# Altium footprint library PcbLib1.PcbLib: 15 footprints
Each footprint in its own frame and in the unit in brackets; x right, y up, seen from the top. Pads: shape width x height; smd on the part's side, far side on the other; paste and mask are expansions set on the pad; w line width, h text height; cw(c..) or ccw(c..) is an arc to the next point about the centre after c.
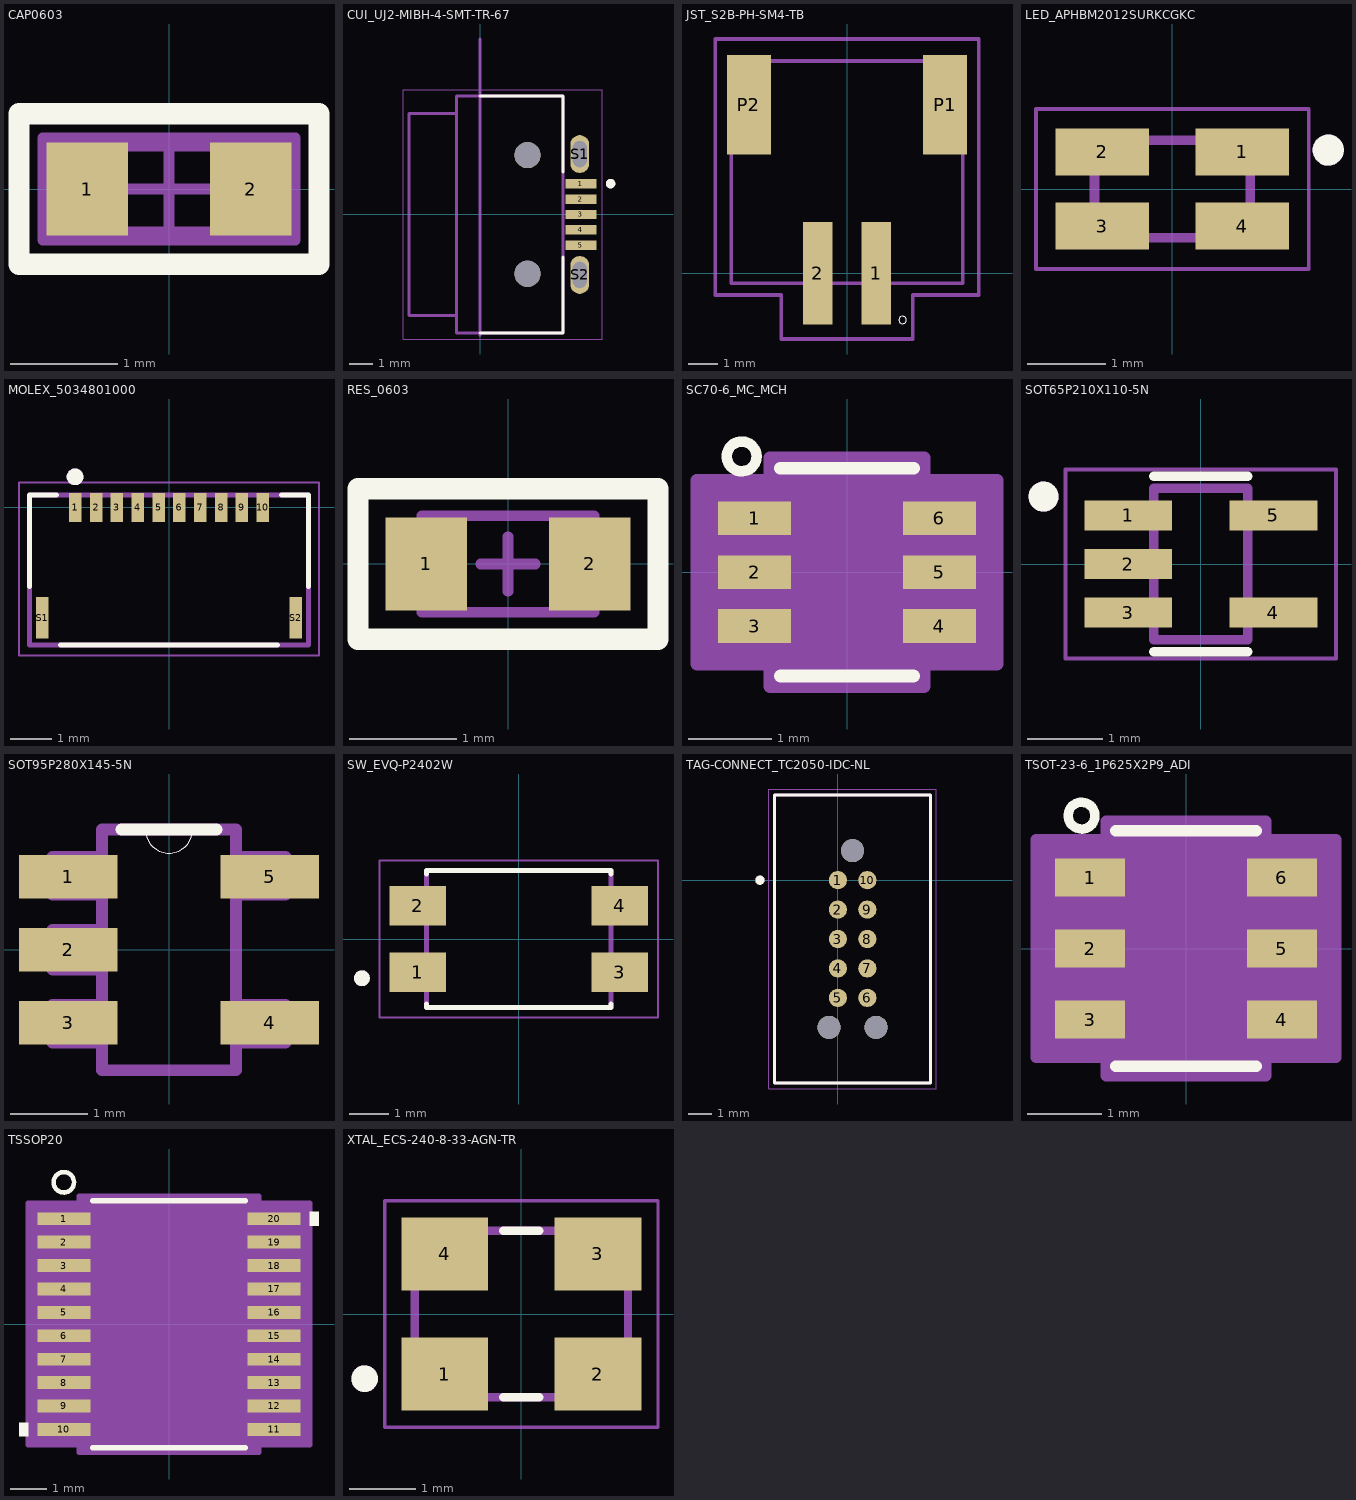
[diagram p0: the footprints below, top view; thin cyan lines are the x and y axes]

## CAP0603 [mil]
pads (2):
  rect 30x34 smd mask+2: 1(-30,0) 2(30,0)
Top Overlay:
  lines w7.87: -55,-27.55 55,-27.55 55,27.55 -55,27.55 -55,-27.55
Mechanical 13:
  lines w3.94: -33.46,-15.75 -33.46,15.75 33.46,15.75 33.46,-15.75 -33.46,-15.75
Mechanical 15:
  lines w3.94: -15.75,0 15.75,0 ; 0,-15.75 0,15.75 ; -46.26,-18.7 -46.26,18.7 46.26,18.7 46.26,-18.7 -46.26,-18.7
3D body "User Library-0603(1608M) Cap.STEP": height 30.71, standoff -0.39, extent -39.37,-15.5 39.38,15.5

## CUI_UJ2-MIBH-4-SMT-TR-67 [mm]
pads (9):
  rect 1.3x0.4 smd mask+0.051: 1(4.25,1.3) 2(4.25,0.65) 3(4.25,0) 4(4.25,-0.65) 5(4.25,-1.3)
  oval 0.8x1.6 hole 0.6 slot 1.1 at 90 deg mask+0.051: S1(4.2,2.55) S2(4.2,-2.55)
  round 1.1 hole 1.1 unplated: ""(2,-2.5) ""(2,2.5)
Top Overlay:
  circle w0.2: c5.5,1.3 r0.1
  lines w0.127: 0,-5 3.5,-5 3.5,-1.8 ; 0,5 3.5,5 3.5,1.8
Mechanical 13:
  circle w0.2: c5.5,1.3 r0.1
  lines w0.127: 0,-5.1 0,7.4 ; -1,-4.25 -3,-4.25 -3,4.25 -1,4.25 ; -1,-4.25 -1,4.25 ; -1,-4.25 -1,-5 3.5,-5 3.5,5 -1,5 -1,4.25
  text "PCB EDGE" at -0.1,5.5 h0.25
Mechanical 15:
  lines w0.05: -3.25,-5.25 5.15,-5.25 5.15,5.25 -3.25,5.25 -3.25,-5.25
3D body "CUI_DEVICES_UJ2-MIBH-4-SMT-TR-67.step": height 4.41, standoff -0.44, extent -3.048,-5 4.602,5

## JST_S2B-PH-SM4-TB [mm]
pads (4):
  rect 1x3.5 smd: 1(1,0) 2(-1,0)
  rect 1.5x3.4 smd: P1(3.35,5.75) P2(-3.35,5.75)
Top Overlay:
  circle w0: c1.9,-1.6 r0.127
Mechanical 13:
  lines w0.127: -3.95,-0.35 -3.95,7.25 3.95,7.25 3.95,-0.35 -3.95,-0.35
Mechanical 15:
  lines w0.127: -4.5,-0.75 -4.5,8 4.5,8 4.5,-0.75 2.25,-0.75 2.25,-2.25 -2.25,-2.25 -2.25,-0.75 -4.5,-0.75
3D body "S2B-PH-SM4-TB.step": height 5.63, standoff 0.03, extent -3.95,-1.361 3.95,7.239

## LED_APHBM2012SURKCGKC [mm]
pads (4):
  rect 1.2x0.6 smd mask+0.051: 1(0.9,0.475) 2(-0.9,0.475) 3(-0.9,-0.475) 4(0.9,-0.475)
Top Overlay:
  circle w0.2: c2,0.5 r0.1
Mechanical 13:
  circle w0.2: c2,0.5 r0.1
  lines w0.127: -1,-0.625 1,-0.625 1,0.625 -1,0.625 -1,-0.625
Mechanical 15:
  lines w0.05: -1.75,-1.025 1.75,-1.025 1.75,1.025 -1.75,1.025 -1.75,-1.025
3D body "APHBM2012SURKCGKC.step": height 0.45, standoff 0, extent -1,-0.625 1,0.625

## MOLEX_5034801000 [mm]
pads (12):
  rect 0.3x0.7 smd: 1(-2.25,0) 2(-1.75,0) 3(-1.25,0) 4(-0.75,0) 5(-0.25,0) 6(0.25,0) 7(0.75,0) 8(1.25,0) 9(1.75,0) 10(2.25,0)
  rect 0.3x1 smd: S1(-3.04,-2.65) S2(3.04,-2.65)
Top Overlay:
  circle w0.2: c-2.255,0.735 r0.1
  lines w0.127: -3.35,-1.9 -3.35,0.3 -2.7,0.3 ; -2.6,-3.3 2.6,-3.3 ; 2.7,0.3 3.35,0.3 3.35,-1.9
Mechanical 13:
  circle w0.2: c-2.255,0.735 r0.1
  lines w0.127: -3.35,-3.3 3.35,-3.3 3.35,0.3 -3.35,0.3 -3.35,-3.3
Mechanical 15:
  lines w0.05: -3.6,-3.55 3.6,-3.55 3.6,0.6 -3.6,0.6 -3.6,-3.55
3D body "5034801000.step": height 1.02, standoff 0, extent -3.35,-3.451 3.35,0.549

## PCBComponent_1 [mm]

## RES_0603 [mil]
pads (2):
  rect 30x34 smd mask+2: 1(-30,0) 2(30,0)
Top Overlay:
  lines w7.87: -55,-27.56 55,-27.56 55,27.56 -55,27.56 -55,-27.56
Mechanical 13:
  lines w3.94: -31.5,-17.72 31.5,-17.72 31.5,17.72 -31.5,17.72 -31.5,-17.72
Mechanical 15:
  lines w3.94: -10,0 10,0 ; 0,-10 0,10 ; -55,-29.53 55,-29.53 55,29.53 -55,29.53 -55,-29.53
3D body "User Library-Panasonic0603.STEP": height 17.72, standoff 0, extent -31.49,-16.13 31.5,16.15

## SC70-6_MC_MCH [mil]
pads (6):
  rect 34.67x16 smd paste+0 mask+0: 1(-43.91,25.59) 2(-43.91,0) 3(-43.91,-25.59) 4(43.91,-25.59) 5(43.91,0) 6(43.91,25.59)
Top Overlay:
  circle w5: c-50,55 r7.07
  lines w6: -31.57,-49.29 31.57,-49.29 ; -31.57,49.29 31.57,49.29
Mechanical 13:
  lines w0: -12,44.29 ccw(c0,44.29) 12,44.29
  lines w1: -47.24,-33.59 -26.57,-33.59 -26.57,-17.59 -47.24,-17.59 -47.24,-33.59 ; -47.24,-8 -26.57,-8 -26.57,8 -47.24,8 -47.24,-8 ; -47.24,17.59 -26.57,17.59 -26.57,33.59 -47.24,33.59 -47.24,17.59 ; -26.57,-44.29 -26.57,44.29 26.57,44.29 26.57,-44.29 -26.57,-44.29 ; 26.57,-33.59 47.24,-33.59 47.24,-17.59 26.57,-17.59 26.57,-33.59 ; 26.57,-8 47.24,-8 47.24,8 26.57,8 26.57,-8 ; 26.57,17.59 47.24,17.59 47.24,33.59 26.57,33.59 26.57,17.59
  text "*" at -29.07,-1.41 h50
Mechanical 15:
  region: 36.57,-54.29 -36.57,-54.29 -36.57,-43.59 -71.24,-43.59 -71.24,43.59 -36.57,43.59 -36.57,54.29 36.57,54.29 36.57,43.59 71.24,43.59 71.24,-43.59 36.57,-43.59
  lines w6: -71.24,-43.59 -71.24,43.59 -36.57,43.59 -36.57,54.29 36.57,54.29 36.57,43.59 71.24,43.59 71.24,-43.59 36.57,-43.59 36.57,-54.29 -36.57,-54.29 -36.57,-43.59 -71.24,-43.59
3D body "SC70-6_MC_MCH.step": height 43.43, standoff 0, extent -47.24,-44.29 47.24,44.29

## SOT65P210X110-5N [mm]
pads (5):
  rect 1.17x0.4 smd mask+0.051: 1(-0.97,0.65) 2(-0.97,0) 3(-0.97,-0.65) 4(0.97,-0.65) 5(0.97,0.65)
Top Overlay:
  circle w0.2: c-2.1,0.9 r0.1
  lines w0.127: -0.625,-1.17 0.625,-1.17 ; -0.625,1.17 0.625,1.17
Mechanical 13:
  circle w0.2: c-2.1,0.9 r0.1
  lines w0.127: -0.625,-1.012 0.625,-1.012 0.625,1.012 -0.625,1.012 -0.625,-1.012
Mechanical 15:
  lines w0.05: -1.805,-1.262 1.805,-1.262 1.805,1.262 -1.805,1.262 -1.805,-1.262
3D body "SC-70_C5_MCH.step": height 1.09, standoff 0, extent -1.194,-1.115 1.194,1.095

## SOT95P280X145-5N [mil]
pads (5):
  rect 50x22 smd: 1(-51,37) 2(-51,0) 3(-51,-37) 4(51,-37) 5(51,37)
Top Overlay:
  lines w0: -12,61 ccw(c0,61) 12,61
  lines w6: -24,61 -12,61 12,61 24,61
Mechanical 13:
  lines w0: -12,61 ccw(c0,61) 12,61
  lines w6: -34,-47 -59,-47 -59,-28 -34,-28 ; -34,-47 -34,-28 ; -34,-47 -34,-61 34,-61 34,-47 ; -34,-28 -34,-10 ; -34,-10 -59,-10 -59,10 -34,10 ; -34,-10 -34,10 ; -34,10 -34,28 ; -34,28 -59,28 -59,47 -34,47 ; -34,28 -34,47 ; -34,47 -34,61 -12,61 12,61 34,61 34,47 ; 34,-47 59,-47 59,-28 34,-28 ; 34,-47 34,-28 ; 34,-28 34,28 ; 34,28 59,28 59,47 34,47 ; 34,28 34,47
3D body "step_temp.STEP": height 57.09, standoff 0, extent -53.15,-57.09 53.15,57.09

## SW_EVQ-P2402W [mm]
height 2.5
pads (4):
  rect 1.45x1 smd: 1(-2.575,-0.85) 2(-2.575,0.85) 3(2.575,-0.85) 4(2.575,0.85)
Top Overlay:
  circle w0.2: c-4,-1 r0.1
  lines w0.127: -2.35,-1.663 -2.35,-1.75 2.35,-1.75 2.35,-1.663 ; -2.35,1.663 -2.35,1.75 2.35,1.75 2.35,1.663
Mechanical 13:
  circle w0.2: c-4,-1 r0.1
  lines w0.127: -2.35,-1.75 2.35,-1.75 2.35,1.75 -2.35,1.75 -2.35,-1.75
Mechanical 15:
  lines w0.05: -3.55,-2 3.55,-2 3.55,2 -3.55,2 -3.55,-2
3D body "EVQ-P2402W.step": height 2.5, standoff 0, extent -2.75,-1.75 2.75,1.75

## TAG-CONNECT_TC2050-IDC-NL [mm]
pads (13):
  round 0.787 smd paste-1: 1(0,0) 2(0,-1.27) 3(0,-2.54) 4(0,-3.81) 5(0,-5.08) 6(1.27,-5.08) 7(1.27,-3.81) 8(1.27,-2.54) 9(1.27,-1.27) 10(1.27,0)
  round 0.991 hole 0.991 unplated: ""(-0.38,-6.35) ""(0.635,1.27) ""(1.65,-6.35)
Top Overlay:
  circle w0.2: c-3.365,0 r0.1
  lines w0.127: -2.73,-8.763 -2.73,3.683 4,3.683 4,-8.763 -2.73,-8.763
Mechanical 13:
  circle w0.2: c-3.365,0 r0.1
  lines w0.127: -2.73,-8.763 -2.73,3.683 4,3.683 4,-8.763 -2.73,-8.763
Mechanical 15:
  lines w0.05: -2.98,-9.013 -2.98,3.933 4.25,3.933 4.25,-9.013 -2.98,-9.013

## TSOT-23-6_1P625X2P9_ADI [mil]
pads (6):
  rect 37x20 smd paste+0 mask+0: 1(-50.5,37.4) 2(-50.5,0) 3(-50.5,-37.4) 4(50.5,-37.4) 5(50.5,0) 6(50.5,37.4)
Top Overlay:
  circle w5: c-55,70 r7.07
  lines w6: -37,-62 37,-62 ; -37,62 37,62
Mechanical 13:
  lines w0: -12,57 ccw(c0,57) 12,57
  lines w1: -55,-46.4 -55,-28.4 -32,-28.4 -32,-46.4 -55,-46.4 ; -55,-9 -55,9 -32,9 -32,-9 -55,-9 ; -55,28.4 -55,46.4 -32,46.4 -32,28.4 -55,28.4 ; -32,-57 32,-57 32,57 -32,57 -32,-57 ; 32,-46.4 32,-28.4 55,-28.4 55,-46.4 32,-46.4 ; 32,-9 32,9 55,9 55,-9 32,-9 ; 32,28.4 32,46.4 55,46.4 55,28.4 32,28.4
  text "*" at -29.5,4 h50
Mechanical 15:
  region: -42,-57.4 -79,-57.4 -79,57.4 -42,57.4 -42,67 42,67 42,57.4 79,57.4 79,-57.4 42,-57.4 42,-67 -42,-67
  lines w6: -79,-57.4 -79,57.4 -42,57.4 -42,67 42,67 42,57.4 79,57.4 79,-57.4 42,-57.4 42,-67 -42,-67 -42,-57.4 -79,-57.4
3D body "TSOT-23-6_1P625X2P9_ADI.step": height 39.09, standoff 0, extent -55,-57.01 55,57.01

## TSSOP20 [mil]
pads (20):
  rect 58x14 smd paste+0 mask+0: 1(-115,115.16) 2(-115,89.57) 3(-115,63.98) 4(-115,38.39) 5(-115,12.8) 6(-115,-12.8) 7(-115,-38.39) 8(-115,-63.98) 9(-115,-89.57) 10(-115,-115.16) 11(115,-115.16) 12(115,-89.57) 13(115,-63.98) 14(115,-38.39) 15(115,-12.8) 16(115,12.8) 17(115,38.39) 18(115,63.98) 19(115,89.57) 20(115,115.16)
Top Overlay:
  circle w5: c-115,155 r11.18
  region: -154,-107.66 -164,-107.66 -164,-122.66 -154,-122.66
  region: 154,122.66 164,122.66 164,107.66 154,107.66
  lines w6: -83.42,-135 83.42,-135 ; -83.42,135 83.42,135
Mechanical 13:
  lines w0: -12,130 ccw(c0,130) 12,130
  lines w1: -130,-121.16 -130,-109.16 -88,-109.16 -88,-121.16 -130,-121.16 ; -130,-95.57 -130,-83.57 -88,-83.57 -88,-95.57 -130,-95.57 ; -130,-69.98 -130,-57.98 -88,-57.98 -88,-69.98 -130,-69.98 ; -130,-44.39 -130,-32.39 -88,-32.39 -88,-44.39 -130,-44.39 ; -130,-18.8 -130,-6.8 -88,-6.8 -88,-18.8 -130,-18.8 ; -130,6.8 -130,18.8 -88,18.8 -88,6.8 -130,6.8 ; -130,32.39 -130,44.39 -88,44.39 -88,32.39 -130,32.39 ; -130,57.98 -130,69.98 -88,69.98 -88,57.98 -130,57.98 ; -130,83.57 -130,95.57 -88,95.57 -88,83.57 -130,83.57 ; -130,109.16 -130,121.16 -88,121.16 -88,109.16 -130,109.16 ; -88,-130 88,-130 88,130 -88,130 -88,-130 ; 88,-121.16 88,-109.16 130,-109.16 130,-121.16 88,-121.16 ; 88,-95.57 88,-83.57 130,-83.57 130,-95.57 88,-95.57 ; 88,-69.98 88,-57.98 130,-57.98 130,-69.98 88,-69.98 ; 88,-44.39 88,-32.39 130,-32.39 130,-44.39 88,-44.39 ; 88,-18.8 88,-6.8 130,-6.8 130,-18.8 88,-18.8 ; 88,6.8 88,18.8 130,18.8 130,6.8 88,6.8 ; 88,32.39 88,44.39 130,44.39 130,32.39 88,32.39 ; 88,57.98 88,69.98 130,69.98 130,57.98 88,57.98 ; 88,83.57 88,95.57 130,95.57 130,83.57 88,83.57 ; 88,109.16 88,121.16 130,121.16 130,109.16 88,109.16
  text "*" at -85.5,77 h50
Mechanical 15:
  region: -98,-132.16 -154,-132.16 -154,132.16 -98,132.16 -98,140 98,140 98,132.16 154,132.16 154,-132.16 98,-132.16 98,-140 -98,-140
  lines w6: -154,-132.16 -154,132.16 -98,132.16 -98,140 98,140 98,132.16 154,132.16 154,-132.16 98,-132.16 98,-140 -98,-140 -98,-132.16 -154,-132.16
3D body "TSSOP20.step": height 47.09, standoff 0, extent -130,-130 130,130

## XTAL_ECS-240-8-33-AGN-TR [mm]
pads (4):
  rect 1.3x1.1 smd: 1(-1.15,-0.9) 2(1.15,-0.9) 3(1.15,0.9) 4(-1.15,0.9)
Top Overlay:
  circle w0.2: c-2.35,-0.97 r0.1
  lines w0.127: -0.27,-1.25 0.27,-1.25 ; -0.27,1.25 0.27,1.25
Mechanical 13:
  circle w0.2: c-2.35,-0.97 r0.1
  lines w0.127: -1.6,-1.25 -1.6,1.25 1.6,1.25 1.6,-1.25 -1.6,-1.25
Mechanical 15:
  lines w0.05: -2.05,-1.7 -2.05,1.7 2.05,1.7 2.05,-1.7 -2.05,-1.7
3D body "ECS-80-12-33-JGN-TR.step": height 0.8, standoff 0, extent -1.6,-1.25 1.6,1.25